# Altium footprint library 3.01-按键按钮.PcbLib: 70 footprints (part 5 of 5)
Each footprint in its own frame and in the unit in brackets; x right, y up, seen from the top. Pads: shape width x height; smd on the part's side, far side on the other; paste and mask are expansions set on the pad; w line width, h text height; cw(c..) or ccw(c..) is an arc to the next point about the centre after c.
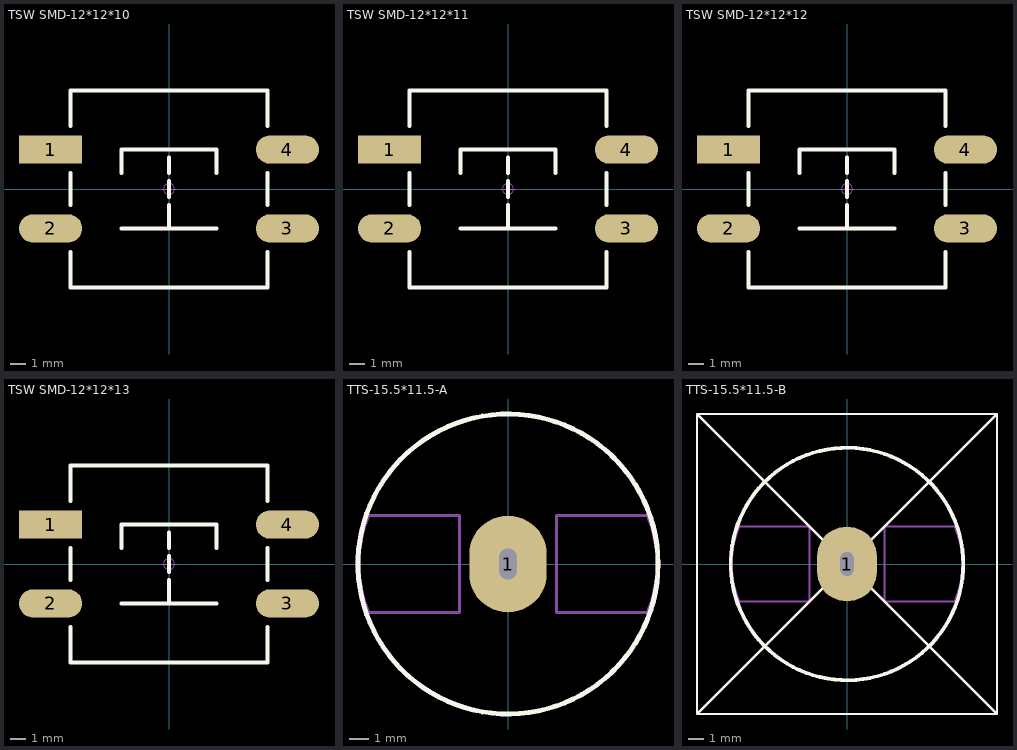
[diagram p4: the footprints below, top view; thin cyan lines are the x and y axes]

## TSW SMD-12*12*10 [mm] "12*12*10mm"
pads (4):
  rect 4x1.8 smd: 1(-7.5,2.5)
  oval 4x1.8 smd: 2(-7.5,-2.5) 3(7.5,-2.5) 4(7.5,2.5)
Top Overlay:
  lines w0.254: -6.25,-4 -6.25,-6.25 6.25,-6.25 6.25,-4 ; -6.25,-1 -6.25,1 ; -6.25,4 -6.25,6.25 6.25,6.25 6.25,4 ; -3,-2.5 3,-2.5 ; -3,1 -3,2.5 3,2.5 3,1 ; 0,-2.5 0,-1 ; 0,-0.5 0,0.5 ; 0,1 0,2 ; 6.25,-1 6.25,1
Mechanical 15:
  circle w0.05: c0,0 r0.35
  lines w0.05: -0.5,0 0.5,0 ; 0,-0.5 0,0.5
3D body "TSW SMD-12x12x10.STEP": height 10.15, standoff 0, extent -7.6,-6 7.6,6

## TSW SMD-12*12*11 [mm] "12*12*11mm           淘宝ID:黄晶宝石"
pads (4):
  rect 4x1.8 smd: 1(-7.5,2.5)
  oval 4x1.8 smd: 2(-7.5,-2.5) 3(7.5,-2.5) 4(7.5,2.5)
Top Overlay:
  lines w0.254: -6.25,-4 -6.25,-6.25 6.25,-6.25 6.25,-4 ; -6.25,-1 -6.25,1 ; -6.25,4 -6.25,6.25 6.25,6.25 6.25,4 ; -3,-2.5 3,-2.5 ; -3,1 -3,2.5 3,2.5 3,1 ; 0,-2.5 0,-1 ; 0,-0.5 0,0.5 ; 0,1 0,2 ; 6.25,-1 6.25,1
Mechanical 15:
  circle w0.05: c0,0 r0.35
  lines w0.05: -0.5,0 0.5,0 ; 0,-0.5 0,0.5
3D body "TSW SMD-12x12x11.STEP": height 11.15, standoff 0, extent -7.6,-6 7.6,6

## TSW SMD-12*12*12 [mm] "12*12*12mm            淘宝ID:黄晶宝石"
pads (4):
  rect 4x1.8 smd: 1(-7.5,2.5)
  oval 4x1.8 smd: 2(-7.5,-2.5) 3(7.5,-2.5) 4(7.5,2.5)
Top Overlay:
  lines w0.254: -6.25,-4 -6.25,-6.25 6.25,-6.25 6.25,-4 ; -6.25,-1 -6.25,1 ; -6.25,4 -6.25,6.25 6.25,6.25 6.25,4 ; -3,-2.5 3,-2.5 ; -3,1 -3,2.5 3,2.5 3,1 ; 0,-2.5 0,-1 ; 0,-0.5 0,0.5 ; 0,1 0,2 ; 6.25,-1 6.25,1
Mechanical 15:
  circle w0.05: c0,0 r0.35
  lines w0.05: -0.5,0 0.5,0 ; 0,-0.5 0,0.5
3D body "TSW SMD-12x12x12.STEP": height 12.15, standoff 0, extent -7.6,-6 7.6,6

## TSW SMD-12*12*13 [mm] "12*12*13mm           淘宝ID:黄晶宝石"
pads (4):
  rect 4x1.8 smd: 1(-7.5,2.5)
  oval 4x1.8 smd: 2(-7.5,-2.5) 3(7.5,-2.5) 4(7.5,2.5)
Top Overlay:
  lines w0.254: -6.25,-4 -6.25,-6.25 6.25,-6.25 6.25,-4 ; -6.25,-1 -6.25,1 ; -6.25,4 -6.25,6.25 6.25,6.25 6.25,4 ; -3,-2.5 3,-2.5 ; -3,1 -3,2.5 3,2.5 3,1 ; 0,-2.5 0,-1 ; 0,-0.5 0,0.5 ; 0,1 0,2 ; 6.25,-1 6.25,1
Mechanical 15:
  circle w0.05: c0,0 r0.35
  lines w0.05: -0.5,0 0.5,0 ; 0,-0.5 0,0.5
3D body "TSW SMD-12x12x13.STEP": height 13.15, standoff 0, extent -7.6,-6 7.6,6

## TTS-15.5*11.5-A [mm] "弹簧按键15.5mm*11.5mm(直径*高度）          淘宝ID:黄晶宝石"
pads (1):
  oval 4x5 hole 0.9 slot 1.6 at 90 deg: 1(0,0)
Top Overlay:
  circle w0.254: c0,0 r7.75
Mechanical 15:
  lines w0.152: -7.25,-2.5 -2.5,-2.5 -2.5,2.5 -3,2.5 -7.25,2.5 ; 7.25,-2.5 2.5,-2.5 2.5,2.5 3,2.5 7.25,2.5
  lines w0.254: -7.25,-2.5 cw(c-1.25,0) -7.25,2.5 ; 7.25,-2.5 ccw(c1.25,0) 7.25,2.5
3D body "弹?": height 12.9, standoff -2.5, extent -7.75,-7.75 7.75,7.75

## TTS-15.5*11.5-B [mm] "弹簧按键15.5mm*11.5mm(直径*高度）          淘宝ID:黄晶宝石"
pads (1):
  oval 4x5 hole 0.9 slot 1.6 at 90 deg: 1(0,0)
Top Overlay:
  circle w0.254: c0,0 r7.75
  lines w0.152: -10,-10 10,-10 ; -10,-10 -10,0 -10,10 ; -10,-10 10,10 ; -10,10 10,10 ; -10,10 10,-10 ; 10,-10 10,10
Mechanical 15:
  lines w0.152: -7.25,-2.5 -2.5,-2.5 -2.5,2.5 -3,2.5 -7.25,2.5 ; 7.25,-2.5 2.5,-2.5 2.5,2.5 3,2.5 7.25,2.5
  lines w0.254: -7.25,-2.5 cw(c-1.25,0) -7.25,2.5 ; 7.25,-2.5 ccw(c1.25,0) 7.25,2.5
3D body "弹?": height 12.9, standoff -2.5, extent -7.75,-7.75 7.75,7.75